# Altium schematic symbol library Ethernet_PHY.SchLib: 1 symbol
Pins are listed as number, name and electrical type; pins without a type are passive.

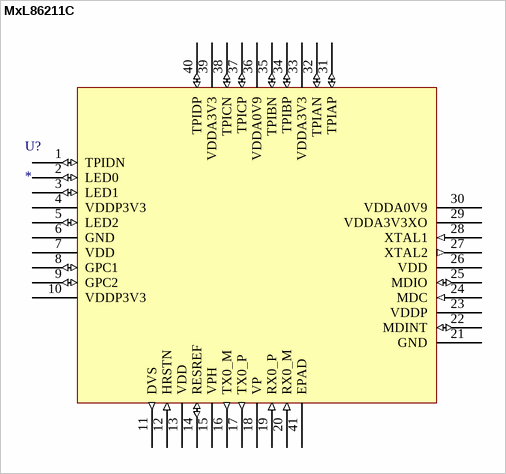
[diagram p0: symbol MxL86211C]

## MxL86211C
designator U?
footprint MXL_VQFN-40_5x5_P0.4_EP3.79
pins: 1 TPIDN (io), 2 LED0 (io), 3 LED1 (io), 4 VDDP3V3 (power), 5 LED2 (io), 6 GND (power), 7 VDD (power), 8 GPC1 (io), 9 GPC2 (io), 10 VDDP3V3 (power), 11 DVS (out), 12 HRSTN (in), 13 VDD (power), 14 RESREF (io), 15 VPH (power), 16 TX0_M (out), 17 TX0_P (out), 18 VP (power), 19 RX0_P (in), 20 RX0_M (in), 21 GND (power), 22 MDINT (io), 23 VDDP (power), 24 MDC (in), 25 MDIO (io), 26 VDD (power), 27 XTAL2 (out), 28 XTAL1 (in), 29 VDDA3V3XO (power), 30 VDDA0V9 (power), 31 TPIAP (io), 32 TPIAN (io), 33 VDDA3V3 (power), 34 TPIBP (io), 35 TPIBN (io), 36 VDDA0V9 (power), 37 TPICP (io), 38 TPICN (io), 39 VDDA3V3 (power), 40 TPIDP (io), 41 EPAD (power)